# Altium footprint library Header_Pcb.PcbLib: 49 footprints (part 2 of 4)
Each footprint in its own frame and in the unit in brackets; x right, y up, seen from the top. Pads: shape width x height; smd on the part's side, far side on the other; paste and mask are expansions set on the pad; w line width, h text height; cw(c..) or ccw(c..) is an arc to the next point about the centre after c.
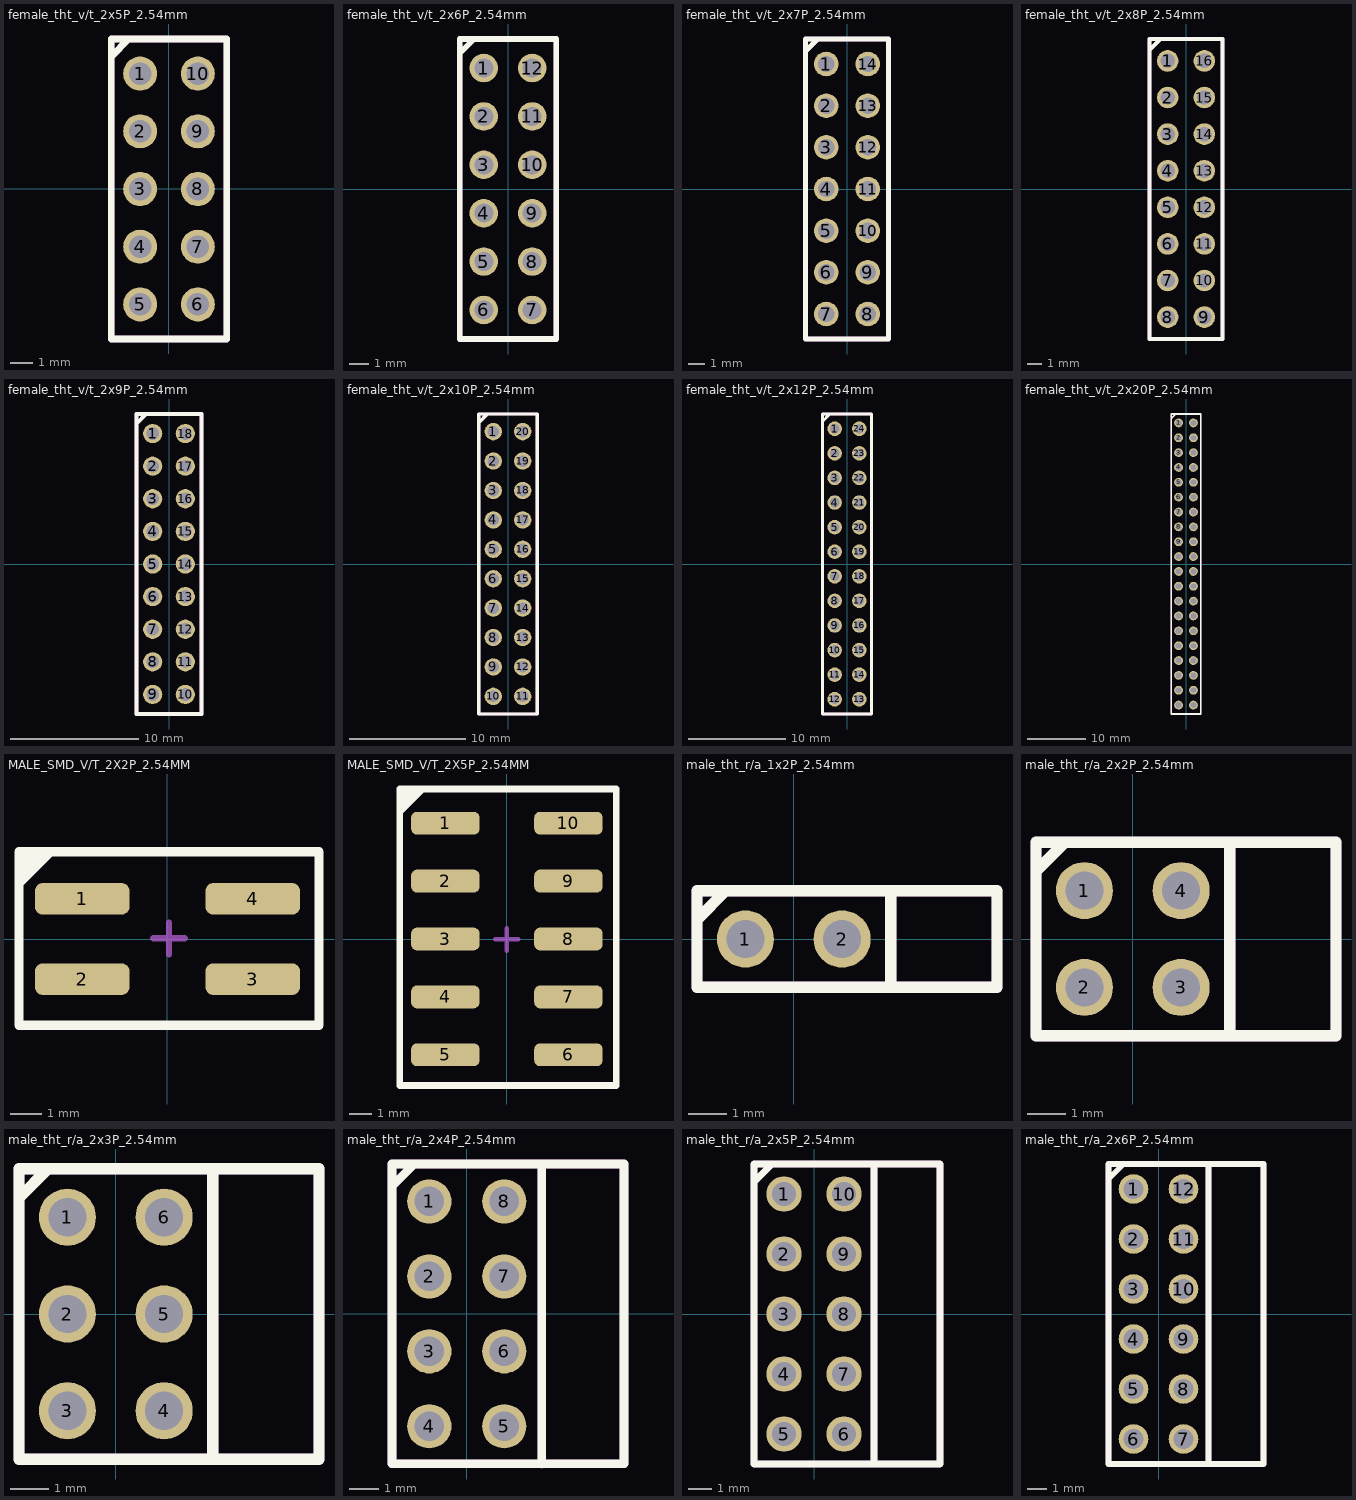
[diagram p1: the footprints below, top view; thin cyan lines are the x and y axes]

## female_tht_v/t_2x5P_2.54mm [mm]
pads (10):
  round 1.5 hole 1: 1(-1.27,5.08) 2(-1.27,2.54) 3(-1.27,0) 4(-1.27,-2.54) 5(-1.27,-5.08) 6(1.27,-5.08) 7(1.27,-2.54) 8(1.27,0) 9(1.27,2.54) 10(1.27,5.08)
Top Overlay:
  lines w0.3: -2.54,5.842 -1.778,6.604 ; -2.54,-6.604 -2.54,5.08 -2.54,6.604 2.54,6.604 2.54,5.08 2.54,-6.604 -2.54,-6.604
Mechanical 13:
  lines w0.3: -2.54,5.842 -1.778,6.604 ; -2.54,-6.604 -2.54,5.08 -2.54,6.604 2.54,6.604 2.54,5.08 2.54,-6.604 -2.54,-6.604
  text ".designator" at 1.078,-4.425 h1.5
3D body "female_header_2x5P_2.54mm.step": height 8.51, standoff -2.99, extent -2.5,-6.6 2.5,6.6

## female_tht_v/t_2x6P_2.54mm [mm]
pads (12):
  round 1.5 hole 1: 1(-1.27,6.35) 2(-1.27,3.81) 3(-1.27,1.27) 4(-1.27,-1.27) 5(-1.27,-3.81) 6(-1.27,-6.35) 7(1.27,-6.35) 8(1.27,-3.81) 9(1.27,-1.27) 10(1.27,1.27) 11(1.27,3.81) 12(1.27,6.35)
Top Overlay:
  lines w0.3: -2.54,7.112 -1.778,7.874 ; -2.54,-7.874 -2.54,6.35 -2.54,7.874 2.54,7.874 2.54,6.35 2.54,-7.874 -2.54,-7.874
Mechanical 13:
  lines w0.3: -2.54,7.112 -1.778,7.874 ; -2.54,-7.874 -2.54,6.35 -2.54,7.874 2.54,7.874 2.54,6.35 2.54,-7.874 -2.54,-7.874
  text ".designator" at 1.078,-4.171 h1.5
3D body "female_header_2x6P_2.54mm.step": height 8.51, standoff -2.99, extent -2.5,-7.87 2.5,7.87

## female_tht_v/t_2x7P_2.54mm [mm]
pads (14):
  round 1.5 hole 1: 1(-1.27,7.62) 2(-1.27,5.08) 3(-1.27,2.54) 4(-1.27,0) 5(-1.27,-2.54) 6(-1.27,-5.08) 7(-1.27,-7.62) 8(1.27,-7.62) 9(1.27,-5.08) 10(1.27,-2.54) 11(1.27,0) 12(1.27,2.54) 13(1.27,5.08) 14(1.27,7.62)
Top Overlay:
  lines w0.3: -2.54,8.382 -1.778,9.144 ; -2.54,-9.144 -2.54,7.62 -2.54,9.144 2.54,9.144 2.54,7.62 2.54,-9.144 -2.54,-9.144
Mechanical 13:
  lines w0.3: -2.54,8.382 -1.778,9.144 ; -2.54,-9.144 -2.54,7.62 -2.54,9.144 2.54,9.144 2.54,7.62 2.54,-9.144 -2.54,-9.144
  text ".designator" at 1.078,-3.409 h1.5
3D body "female_header_2x7P_2.54mm.step": height 8.51, standoff -2.99, extent -2.5,-9.14 2.5,9.14

## female_tht_v/t_2x8P_2.54mm [mm]
pads (16):
  round 1.5 hole 1: 1(-1.27,8.89) 2(-1.27,6.35) 3(-1.27,3.81) 4(-1.27,1.27) 5(-1.27,-1.27) 6(-1.27,-3.81) 7(-1.27,-6.35) 8(-1.27,-8.89) 9(1.27,-8.89) 10(1.27,-6.35) 11(1.27,-3.81) 12(1.27,-1.27) 13(1.27,1.27) 14(1.27,3.81) 15(1.27,6.35) 16(1.27,8.89)
Top Overlay:
  lines w0.3: -2.54,9.652 -1.778,10.414 ; -2.54,-10.414 2.54,-10.414 2.54,8.89 2.54,10.414 -2.54,10.414 -2.54,8.89 -2.54,-10.414
Mechanical 13:
  lines w0.3: -2.54,9.652 -1.778,10.414 ; -2.54,-10.414 2.54,-10.414 2.54,8.89 2.54,10.414 -2.54,10.414 -2.54,8.89 -2.54,-10.414
  text ".designator" at 1.078,-3.155 h1.5
3D body "female_header_2x8P_2.54mm.step": height 8.51, standoff -2.99, extent -2.5,-10.41 2.5,10.41

## female_tht_v/t_2x9P_2.54mm [mm]
pads (18):
  round 1.5 hole 1: 1(-1.27,10.16) 2(-1.27,7.62) 3(-1.27,5.08) 4(-1.27,2.54) 5(-1.27,0) 6(-1.27,-2.54) 7(-1.27,-5.08) 8(-1.27,-7.62) 9(-1.27,-10.16) 10(1.27,-10.16) 11(1.27,-7.62) 12(1.27,-5.08) 13(1.27,-2.54) 14(1.27,0) 15(1.27,2.54) 16(1.27,5.08) 17(1.27,7.62) 18(1.27,10.16)
Top Overlay:
  lines w0.3: -2.54,10.922 -1.778,11.684 ; -2.54,-11.684 -2.54,10.16 -2.54,11.684 2.54,11.684 2.54,10.16 2.54,-11.684 -2.54,-11.684
Mechanical 13:
  lines w0.3: -2.54,10.922 -1.778,11.684 ; -2.54,-11.684 -2.54,10.16 -2.54,11.684 2.54,11.684 2.54,10.16 2.54,-11.684 -2.54,-11.684
  text ".designator" at 1.078,-3.917 h1.5
3D body "female_header_2x9P_2.54mm.step": height 8.51, standoff -2.99, extent -2.5,-11.68 2.5,11.68

## female_tht_v/t_2x10P_2.54mm [mm]
pads (20):
  round 1.5 hole 1: 1(-1.27,11.43) 2(-1.27,8.89) 3(-1.27,6.35) 4(-1.27,3.81) 5(-1.27,1.27) 6(-1.27,-1.27) 7(-1.27,-3.81) 8(-1.27,-6.35) 9(-1.27,-8.89) 10(-1.27,-11.43) 11(1.27,-11.43) 12(1.27,-8.89) 13(1.27,-6.35) 14(1.27,-3.81) 15(1.27,-1.27) 16(1.27,1.27) 17(1.27,3.81) 18(1.27,6.35) 19(1.27,8.89) 20(1.27,11.43)
Top Overlay:
  lines w0.3: -2.54,12.192 -1.778,12.954 ; -2.54,-12.954 2.54,-12.954 2.54,11.43 2.54,12.954 -2.54,12.954 -2.54,11.43 -2.54,-12.954
Mechanical 13:
  lines w0.3: -2.54,12.192 -1.778,12.954 ; -2.54,-12.954 2.54,-12.954 2.54,11.43 2.54,12.954 -2.54,12.954 -2.54,11.43 -2.54,-12.954
  text ".designator" at 1.078,-4.171 h1.5
3D body "female_header_2x10P_2.54mm.step": height 8.51, standoff -2.99, extent -2.5,-12.95 2.5,12.95

## female_tht_v/t_2x12P_2.54mm [mm]
pads (24):
  round 1.5 hole 1: 1(-1.27,13.97) 2(-1.27,11.43) 3(-1.27,8.89) 4(-1.27,6.35) 5(-1.27,3.81) 6(-1.27,1.27) 7(-1.27,-1.27) 8(-1.27,-3.81) 9(-1.27,-6.35) 10(-1.27,-8.89) 11(-1.27,-11.43) 12(-1.27,-13.97) 13(1.27,-13.97) 14(1.27,-11.43) 15(1.27,-8.89) 16(1.27,-6.35) 17(1.27,-3.81) 18(1.27,-1.27) 19(1.27,1.27) 20(1.27,3.81) 21(1.27,6.35) 22(1.27,8.89) 23(1.27,11.43) 24(1.27,13.97)
Top Overlay:
  lines w0.3: -2.54,14.732 -1.778,15.494 ; -2.54,-15.494 2.54,-15.494 2.54,13.97 2.54,15.494 -2.54,15.494 -2.54,13.97 -2.54,-15.494
Mechanical 13:
  lines w0.3: -2.54,14.732 -1.778,15.494 ; -2.54,-15.494 2.54,-15.494 2.54,13.97 2.54,15.494 -2.54,15.494 -2.54,13.97 -2.54,-15.494
  text ".designator" at 0.824,-3.666 h1.5
3D body "female vt 2x12P 2.54mm.step": height 8.51, standoff -2.99, extent -2.54,-15.44 2.5,15.44

## female_tht_v/t_2x20P_2.54mm [mm]
pads (40):
  round 1.5 hole 1: 1(-1.27,24.13) 2(-1.27,21.59) 3(-1.27,19.05) 4(-1.27,16.51) 5(-1.27,13.97) 6(-1.27,11.43) 7(-1.27,8.89) 8(-1.27,6.35) 9(-1.27,3.81) 10(-1.27,1.27) 11(-1.27,-1.27) 12(-1.27,-3.81) 13(-1.27,-6.35) 14(-1.27,-8.89) 15(-1.27,-11.43) 16(-1.27,-13.97) 17(-1.27,-16.51) 18(-1.27,-19.05) 19(-1.27,-21.59) 20(-1.27,-24.13) 21(1.27,-24.13) 22(1.27,-21.59) 23(1.27,-19.05) 24(1.27,-16.51) 25(1.27,-13.97) 26(1.27,-11.43) 27(1.27,-8.89) 28(1.27,-6.35) 29(1.27,-3.81) 30(1.27,-1.27) 31(1.27,1.27) 32(1.27,3.81) 33(1.27,6.35) 34(1.27,8.89) 35(1.27,11.43) 36(1.27,13.97) 37(1.27,16.51) 38(1.27,19.05) 39(1.27,21.59) 40(1.27,24.13)
Top Overlay:
  lines w0.3: -2.54,24.892 -1.778,25.654 ; -2.54,-25.654 2.54,-25.654 2.54,24.13 2.54,25.654 -2.54,25.654 -2.54,24.13 -2.54,-25.654
Mechanical 13:
  lines w0.3: -2.54,24.892 -1.778,25.654 ; -2.54,-25.654 2.54,-25.654 2.54,24.13 2.54,25.654 -2.54,25.654 -2.54,24.13 -2.54,-25.654
  text ".designator" at 1.078,-3.155 h1.5
3D body "female vt 2x20P 2.54mm.step.step": height 8.51, standoff -3.19, extent -2.5,-25.525 2.5,25.525

## MALE_SMD_V/T_2X2P_2.54MM [mm]
pads (4):
  rrect50% 3x1 smd: 1(-2.7,1.27) 2(-2.7,-1.27) 3(2.7,-1.27) 4(2.7,1.27)
Top Overlay:
  lines w0.3: -4.7,1.77 -3.7,2.77 ; -4.7,2.02 -3.95,2.77 ; -4.7,2.27 -4.2,2.77 ; -4.7,2.52 -4.45,2.77 ; -4.215,2.77 -4.2,2.77 ; -4.45,2.77 -4.45,2.77 ; -4.2,2.77 -4.2,2.77 ; -4.2,2.77 -4.2,2.77 ; -3.95,2.77 -3.95,2.77 ; -3.95,2.77 -3.95,2.77 ; -4.7,-2.73 4.8,-2.73 4.8,2.77 -4.7,2.77 -4.7,-2.73
Mechanical 13:
  lines w0.2: -4.7,1.77 -3.7,2.77 ; -4.7,-2.73 4.8,-2.73 4.8,2.77 -4.7,2.77 -4.7,-2.73
Mechanical 15:
  lines w0.2: -0.45,0.02 0.55,0.02 ; 0.05,-0.48 0.05,0.52 ; -4.7,-2.73 4.8,-2.73 4.8,2.77 -4.7,2.77 -4.7,-2.73
3D body "male_smd_vt_2x2p_2.54mm.stp": height 9.61, standoff 0.01, extent -3.7,-2.52 3.8,2.56

## MALE_SMD_V/T_2X5P_2.54MM [mm]
pads (10):
  rrect50% 3x1 smd: 1(-2.7,5.08) 2(-2.7,2.54) 3(-2.7,0) 4(-2.7,-2.54) 5(-2.7,-5.08) 6(2.7,-5.08) 7(2.7,-2.54) 8(2.7,0) 9(2.7,2.54) 10(2.7,5.08)
Top Overlay:
  lines w0.3: -4.7,5.58 -3.7,6.58 ; -4.7,5.83 -3.95,6.58 ; -4.7,6.08 -4.2,6.58 ; -4.7,6.33 -4.45,6.58 ; -4.215,6.58 -4.2,6.58 ; -4.45,6.58 -4.45,6.58 ; -4.2,6.58 -4.2,6.58 ; -4.2,6.58 -4.2,6.58 ; -3.95,6.58 -3.95,6.58 ; -3.95,6.58 -3.95,6.58 ; -4.7,-6.42 -4.7,6.58 4.8,6.58 4.8,-6.42 -4.7,-6.42
Mechanical 13:
  lines w0.2: -4.7,5.58 -3.7,6.58 ; -4.7,-6.42 -4.7,6.58 4.8,6.58 4.8,-6.42 -4.7,-6.42
  text ".Designator" at -2.7,0.065 h1.25
Mechanical 15:
  lines w0.2: -0.5,-0.02 0.5,-0.02 ; 0,-0.52 0,0.48 ; -4.7,-6.42 -4.7,6.58 4.8,6.58 4.8,-6.42 -4.7,-6.42
3D body "male_smd_vt_2x5p_2.54mm.step": height 9.67, standoff 0.01, extent -3.5,-6.35 3.5,6.35

## male_tht_r/a_1x2P_2.54mm [mm]
pads (2):
  round 1.5 hole 1: 1(-1.27,0) 2(1.27,0)
Top Overlay:
  lines w0.3: -2.54,0.508 -1.778,1.27 ; 2.54,-1.27 2.54,1.27 ; 2.54,-1.27 -2.54,-1.27 -2.54,1.27 2.54,1.27 ; 2.54,-1.27 5.334,-1.27 5.334,1.27 2.54,1.27
Mechanical 13:
  lines w0.3: 2.54,-1.27 2.54,1.27 ; 2.54,-1.27 -2.54,-1.27 -2.54,1.27 2.54,1.27 ; 2.54,-1.27 5.334,-1.27 5.334,1.27 2.54,1.27
  text ".designator" at -2.393,-0.824 h1.5
3D body "male_90c_2x1P_2.54mm.step": height 6.77, standoff -5.99, extent -2.516,-1.27 5.564,1.27

## male_tht_r/a_2x2P_2.54mm [mm]
pads (4):
  round 1.5 hole 1: 1(-1.27,1.27) 2(-1.27,-1.27) 3(1.27,-1.27) 4(1.27,1.27)
Top Overlay:
  lines w0.3: -2.54,1.778 -1.778,2.54 ; 2.54,-2.54 5.334,-2.54 5.334,2.54 2.54,2.54 ; 2.54,-2.54 -2.54,-2.54 -2.54,2.54 2.54,2.54 ; 2.54,-2.54 2.54,2.54
Mechanical 13:
  lines w0.3: 2.54,-2.54 5.334,-2.54 5.334,2.54 2.54,2.54 ; 2.54,-2.54 -2.54,-2.54 -2.54,2.54 2.54,2.54 ; 2.54,-2.54 2.54,2.54
  text ".designator" at -2.24,-0.863 h1.5
3D body "male_90c_2x2P_2.54mm.step": height 6.77, standoff -5.99, extent -2.54,-2.54 5.54,2.54

## male_tht_r/a_2x3P_2.54mm [mm]
pads (6):
  round 1.5 hole 1: 1(-1.27,2.54) 2(-1.27,0) 3(-1.27,-2.54) 4(1.27,-2.54) 5(1.27,0) 6(1.27,2.54)
Top Overlay:
  lines w0.3: -2.54,3.048 -1.778,3.81 ; 2.54,-3.81 5.334,-3.81 5.334,3.81 2.54,3.81 ; 2.54,-3.81 -2.54,-3.81 -2.54,3.81 2.54,3.81 ; 2.54,-3.81 2.54,3.81
Mechanical 13:
  lines w0.3: 2.54,-3.81 5.334,-3.81 5.334,3.81 2.54,3.81 ; 2.54,-3.81 -2.54,-3.81 -2.54,3.81 2.54,3.81 ; 2.54,-3.81 2.54,3.81
  text ".designator" at 1.078,-3.409 h1.5
3D body "male_90c_2x3P_2.54mm.step": height 6.77, standoff -5.99, extent -2.54,-3.81 5.54,3.81

## male_tht_r/a_2x4P_2.54mm [mm]
pads (8):
  round 1.5 hole 1: 1(-1.27,3.81) 2(-1.27,1.27) 3(-1.27,-1.27) 4(-1.27,-3.81) 5(1.27,-3.81) 6(1.27,-1.27) 7(1.27,1.27) 8(1.27,3.81)
Top Overlay:
  lines w0.3: -2.54,4.318 -1.778,5.08 ; 2.54,-5.08 2.54,5.08 ; 2.54,-5.08 -2.54,-5.08 -2.54,5.08 2.54,5.08 ; 2.54,-5.08 5.334,-5.08 5.334,5.08 2.54,5.08
Mechanical 13:
  lines w0.3: 2.54,-5.09 2.54,5.08 ; 2.54,5.08 5.334,5.08 5.334,-5.08 2.54,-5.08 -2.54,-5.08 -2.54,5.08 2.54,5.08
  text ".designator" at 1.078,-3.663 h1.5
3D body "male_90c_2x4P_2.54mm.step": height 6.77, standoff -5.99, extent -2.54,-5.08 5.54,5.08

## male_tht_r/a_2x5P_2.54mm [mm]
pads (10):
  round 1.5 hole 1: 1(-1.27,5.08) 2(-1.27,2.54) 3(-1.27,0) 4(-1.27,-2.54) 5(-1.27,-5.08) 6(1.27,-5.08) 7(1.27,-2.54) 8(1.27,0) 9(1.27,2.54) 10(1.27,5.08)
Top Overlay:
  lines w0.3: -2.54,5.588 -1.778,6.35 ; 2.54,-6.35 2.54,6.35 ; 2.54,-6.35 -2.54,-6.35 -2.54,6.35 2.54,6.35 ; 2.54,-6.35 5.334,-6.35 5.334,6.35 2.54,6.35
Mechanical 13:
  lines w0.3: 2.54,-6.35 2.54,6.35 ; 2.54,6.35 5.334,6.35 5.334,-6.35 0,-6.35 -2.54,-6.35 -2.54,6.35 2.54,6.35
  text ".designator" at 1.078,-3.663 h1.5
3D body "male_90c_2x5P_2.54mm.step": height 6.77, standoff -5.99, extent -2.54,-6.35 5.54,6.35

## male_tht_r/a_2x6P_2.54mm [mm]
pads (12):
  round 1.5 hole 1: 1(-1.27,6.35) 2(-1.27,3.81) 3(-1.27,1.27) 4(-1.27,-1.27) 5(-1.27,-3.81) 6(-1.27,-6.35) 7(1.27,-6.35) 8(1.27,-3.81) 9(1.27,-1.27) 10(1.27,1.27) 11(1.27,3.81) 12(1.27,6.35)
Top Overlay:
  lines w0.3: -2.54,6.858 -1.778,7.62 ; 2.54,-7.62 2.54,7.62 ; 2.54,-7.62 -2.54,-7.62 -2.54,7.62 2.54,7.62 ; 2.54,-7.62 5.334,-7.62 5.334,7.62 2.54,7.62
Mechanical 13:
  lines w0.3: 2.54,-7.62 2.54,7.62 ; 2.54,7.62 5.334,7.62 5.334,-7.62 0,-7.62 -2.54,-7.62 -2.54,7.62 2.54,7.62
  text ".designator" at 1.078,-3.917 h1.5
3D body "male_90c_2x6P_2.54mm.step": height 6.77, standoff -5.99, extent -2.54,-7.62 5.54,7.62